# Altium integrated library Passive Buzzer 9mm.IntLib: 1 symbol
Pins are listed as number, name and electrical type; pins without a type are passive.

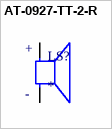
[diagram p0: symbol AT-0927-TT-2-R]

## AT-0927-TT-2-R
designator LS?
AUDIO TRANSDUCER 3VP-P 70MA 20OHM 86DBA; MF: {'manufacturer': u'PUI Audio, Inc.'}; MP: AT-0927-TT-2-R; Package: None; Price: None; Value: *; Availability: Unavailable
footprint XDCR_AT-0927-TT-2-R
pins: N, P